# Altium footprint library Connector Power.PcbLib: 83 footprints (part 5 of 6)
Each footprint in its own frame and in the unit in brackets; x right, y up, seen from the top. Pads: shape width x height; smd on the part's side, far side on the other; paste and mask are expansions set on the pad; w line width, h text height; cw(c..) or ccw(c..) is an arc to the next point about the centre after c.
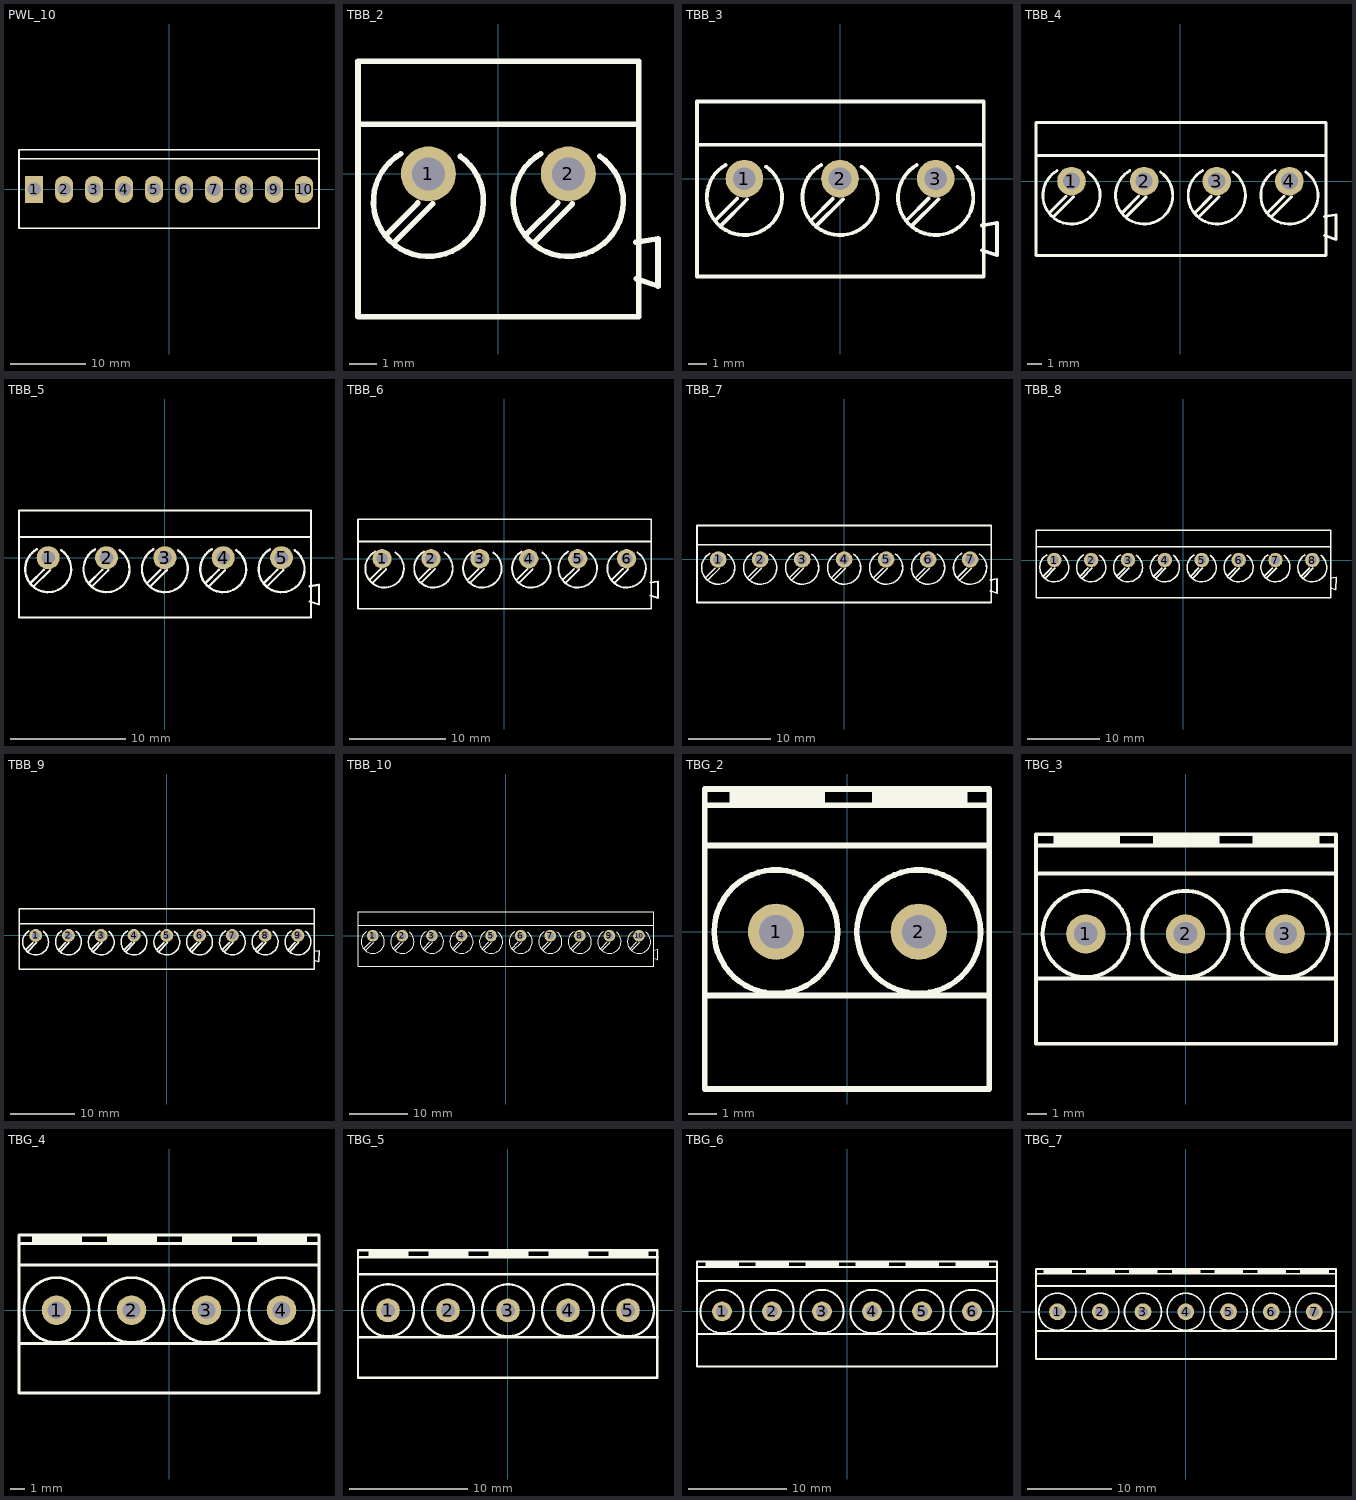
[diagram p4: the footprints below, top view; thin cyan lines are the x and y axes]

## PWL_10 [mm] "Connector; Header; 10 Position"
height 0.001
pads (10):
  rect 2.4x3.6 hole 1.8: 1(-17.82,0)
  oval 2.4x3.6 hole 1.8: 2(-13.86,0) 3(-9.9,0) 4(-5.94,0) 5(-1.98,0) 6(1.98,0) 7(5.94,0) 8(9.9,0) 9(13.86,0) 10(17.82,0)
Top Overlay:
  lines w0.2: -19.82,4.064 19.8,4.064 ; -19.82,-5.1 -19.82,5.207 19.8,5.207 19.8,-5.1 -19.82,-5.1
3D body "PWL-10.stp": height 13.5, standoff -4, extent -19.8,-5 19.8,5

## TBB_2 [mm] "Terminal Block Blue"
pads (2):
  round 2 / inner round 2 / far side rect 2.4x3 hole 1.2: 1(-2.54,0)
  round 2 / inner round 2 / far side oval 2.4x3 hole 1.2: 2(2.54,0)
Top Overlay:
  lines w0.2: -5.1,1.8 5.1,1.8 ; -4.071,-2.209 -2.921,-1.059 ; -3.789,-2.491 -2.389,-1.091 ; -3.54,0.732 ccw(c-2.54,-1) -1.393,0.638 ; 1.009,-2.209 2.159,-1.059 ; 1.291,-2.491 2.691,-1.091 ; 1.54,0.732 ccw(c2.54,-1) 3.687,0.638 ; 4.995,-2.484 5.8,-2.35 5.8,-4.075 5.004,-3.81 ; -5.1,-5.2 -5.1,4.1 5.1,4.1 5.1,-5.2 -5.1,-5.2
3D body "Socket Blue_2Pin.STEP": height 12.52, standoff -6.68, extent -4.965,-5.08 5.777,3.988

## TBB_3 [mm] "Terminal Block Blue"
pads (3):
  round 2 / inner round 2 / far side rect 2.4x3 hole 1.2: 1(-5.08,0)
  round 2 / inner round 2 / far side oval 2.4x3 hole 1.2: 2(0,0) 3(5.08,0)
Top Overlay:
  lines w0.2: -7.6,1.8 7.64,1.8 ; -6.611,-2.209 -5.461,-1.059 ; -6.329,-2.491 -4.929,-1.091 ; -6.08,0.732 ccw(c-5.08,-1) -3.933,0.638 ; -1.531,-2.209 -0.381,-1.059 ; -1.249,-2.491 0.151,-1.091 ; -1,0.732 ccw(c0,-1) 1.147,0.638 ; 3.549,-2.209 4.699,-1.059 ; 3.831,-2.491 5.231,-1.091 ; 4.08,0.732 ccw(c5.08,-1) 6.227,0.638 ; 7.535,-2.484 8.34,-2.35 8.34,-4.075 7.544,-3.81 ; -7.6,-5.2 7.64,-5.2 7.64,4.1 -7.6,4.1 -7.6,-5.2
3D body "Socket Blue_3Pin.STEP": height 12.78, standoff -6.43, extent -7.494,-5.069 8.328,3.999

## TBB_4 [mm] "Terminal Block Blue"
pads (4):
  round 2 / inner round 2 / far side rect 2.4x3 hole 1.2: 1(-7.62,0)
  round 2 / inner round 2 / far side oval 2.4x3 hole 1.2: 2(-2.54,0) 3(2.54,0) 4(7.62,0)
Top Overlay:
  lines w0.2: -10.1,1.8 10.18,1.8 ; -9.151,-2.209 -8.001,-1.059 ; -8.869,-2.491 -7.469,-1.091 ; -8.62,0.732 ccw(c-7.62,-1) -6.473,0.638 ; -4.071,-2.209 -2.921,-1.059 ; -3.789,-2.491 -2.389,-1.091 ; -3.54,0.732 ccw(c-2.54,-1) -1.393,0.638 ; 1.009,-2.209 2.159,-1.059 ; 1.291,-2.491 2.691,-1.091 ; 1.54,0.732 ccw(c2.54,-1) 3.687,0.638 ; 6.089,-2.209 7.239,-1.059 ; 6.371,-2.491 7.771,-1.091 ; 6.62,0.732 ccw(c7.62,-1) 8.767,0.638 ; 10.075,-2.484 10.88,-2.35 10.88,-4.075 10.084,-3.81 ; -10.1,-5.2 -10.1,4.1 10.18,4.1 10.18,-5.2 -10.1,-5.2
3D body "Socket Blue_4Pin.STEP": height 12.52, standoff -6.68, extent -10.031,-5.029 10.871,4.039

## TBB_5 [mm] "Terminal Block Blue"
pads (5):
  round 2 / inner round 2 / far side rect 2.4x3 hole 1.2: 1(-10.16,0)
  round 2 / inner round 2 / far side oval 2.4x3 hole 1.2: 2(-5.08,0) 3(0,0) 4(5.08,0) 5(10.16,0)
Top Overlay:
  lines w0.2: -12.7,1.8 12.72,1.8 ; -11.691,-2.209 -10.541,-1.059 ; -11.409,-2.491 -10.009,-1.091 ; -11.16,0.732 ccw(c-10.16,-1) -9.013,0.638 ; -6.611,-2.209 -5.461,-1.059 ; -6.329,-2.491 -4.929,-1.091 ; -6.08,0.732 ccw(c-5.08,-1) -3.933,0.638 ; -1.531,-2.209 -0.381,-1.059 ; -1.249,-2.491 0.151,-1.091 ; -1,0.732 ccw(c0,-1) 1.147,0.638 ; 3.549,-2.209 4.699,-1.059 ; 3.831,-2.491 5.231,-1.091 ; 4.08,0.732 ccw(c5.08,-1) 6.227,0.638 ; 8.629,-2.209 9.779,-1.059 ; 8.911,-2.491 10.311,-1.091 ; 9.16,0.732 ccw(c10.16,-1) 11.307,0.638 ; 12.615,-2.484 13.42,-2.35 13.42,-4.075 12.624,-3.81 ; -12.7,-5.2 -12.7,4.1 12.72,4.1 12.72,-5.2 -12.7,-5.2
3D body "Socket Blue_5Pin.STEP": height 12.52, standoff -6.68, extent -12.647,-5.042 13.335,4.026

## TBB_6 [mm] "Terminal Block Blue"
pads (6):
  round 2 / inner round 2 / far side rect 2.4x3 hole 1.2: 1(-12.7,0)
  round 2 / inner round 2 / far side oval 2.4x3 hole 1.2: 2(-7.62,0) 3(-2.54,0) 4(2.54,0) 5(7.62,0) 6(12.7,0)
Top Overlay:
  lines w0.2: -15.2,1.8 15.26,1.8 ; -13.971,-2.209 -12.821,-1.059 ; -13.689,-2.491 -12.289,-1.091 ; -13.44,0.732 ccw(c-12.44,-1) -11.293,0.638 ; -8.891,-2.209 -7.741,-1.059 ; -8.609,-2.491 -7.209,-1.091 ; -8.36,0.732 ccw(c-7.36,-1) -6.213,0.638 ; -3.811,-2.209 -2.661,-1.059 ; -3.529,-2.491 -2.129,-1.091 ; -3.28,0.732 ccw(c-2.28,-1) -1.133,0.638 ; 1.269,-2.209 2.419,-1.059 ; 1.551,-2.491 2.951,-1.091 ; 1.8,0.732 ccw(c2.8,-1) 3.947,0.638 ; 6.089,-2.209 7.239,-1.059 ; 6.371,-2.491 7.771,-1.091 ; 6.62,0.732 ccw(c7.62,-1) 8.767,0.638 ; 11.169,-2.209 12.319,-1.059 ; 11.451,-2.491 12.851,-1.091 ; 11.7,0.732 ccw(c12.7,-1) 13.847,0.638 ; 15.155,-2.484 15.96,-2.35 15.96,-4.075 15.164,-3.81 ; -15.2,-5.2 15.26,-5.2 15.26,4.1 -15.2,4.1 -15.2,-5.2
3D body "Socket Blue_6Pin.STEP": height 12.52, standoff -6.68, extent -15.138,-5.029 15.924,4.039

## TBB_7 [mm] "Terminal Block Blue"
pads (7):
  round 2 / inner round 2 / far side rect 2.4x3 hole 1.2: 1(-15.24,0)
  round 2 / inner round 2 / far side oval 2.4x3 hole 1.2: 2(-10.16,0) 3(-5.08,0) 4(0,0) 5(5.08,0) 6(10.16,0) 7(15.24,0)
Top Overlay:
  lines w0.2: -17.8,1.8 17.8,1.8 ; -16.771,-2.209 -15.621,-1.059 ; -16.489,-2.491 -15.089,-1.091 ; -16.24,0.732 ccw(c-15.24,-1) -14.093,0.638 ; -11.691,-2.209 -10.541,-1.059 ; -11.409,-2.491 -10.009,-1.091 ; -11.16,0.732 ccw(c-10.16,-1) -9.013,0.638 ; -6.611,-2.209 -5.461,-1.059 ; -6.329,-2.491 -4.929,-1.091 ; -6.08,0.732 ccw(c-5.08,-1) -3.933,0.638 ; -1.531,-2.209 -0.381,-1.059 ; -1.249,-2.491 0.151,-1.091 ; -1,0.732 ccw(c0,-1) 1.147,0.638 ; 3.549,-2.209 4.699,-1.059 ; 3.831,-2.491 5.231,-1.091 ; 4.08,0.732 ccw(c5.08,-1) 6.227,0.638 ; 8.629,-2.209 9.779,-1.059 ; 8.911,-2.491 10.311,-1.091 ; 9.16,0.732 ccw(c10.16,-1) 11.307,0.638 ; 13.709,-2.209 14.859,-1.059 ; 13.991,-2.491 15.391,-1.091 ; 14.24,0.732 ccw(c15.24,-1) 16.387,0.638 ; 17.695,-2.484 18.5,-2.35 18.5,-4.075 17.704,-3.81 ; -17.8,-5.2 17.8,-5.2 17.8,4.1 -17.8,4.1 -17.8,-5.2
3D body "Socket Blue_7Pin.STEP": height 12.52, standoff -6.68, extent -17.685,-5.025 18.457,4.042

## TBB_8 [mm] "Terminal Block Blue"
pads (8):
  round 2 / inner round 2 / far side rect 2.4x3 hole 1.2: 1(-17.78,0)
  round 2 / inner round 2 / far side oval 2.4x3 hole 1.2: 2(-12.7,0) 3(-7.62,0) 4(-2.54,0) 5(2.54,0) 6(7.62,0) 7(12.7,0) 8(17.78,0)
Top Overlay:
  lines w0.2: -20.3,1.8 20.34,1.8 ; -19.311,-2.209 -18.161,-1.059 ; -19.029,-2.491 -17.629,-1.091 ; -18.78,0.732 ccw(c-17.78,-1) -16.633,0.638 ; -14.231,-2.209 -13.081,-1.059 ; -13.949,-2.491 -12.549,-1.091 ; -13.7,0.732 ccw(c-12.7,-1) -11.553,0.638 ; -9.151,-2.209 -8.001,-1.059 ; -8.869,-2.491 -7.469,-1.091 ; -8.62,0.732 ccw(c-7.62,-1) -6.473,0.638 ; -4.071,-2.209 -2.921,-1.059 ; -3.789,-2.491 -2.389,-1.091 ; -3.54,0.732 ccw(c-2.54,-1) -1.393,0.638 ; 1.009,-2.209 2.159,-1.059 ; 1.291,-2.491 2.691,-1.091 ; 1.54,0.732 ccw(c2.54,-1) 3.687,0.638 ; 6.089,-2.209 7.239,-1.059 ; 6.371,-2.491 7.771,-1.091 ; 6.62,0.732 ccw(c7.62,-1) 8.767,0.638 ; 11.169,-2.209 12.319,-1.059 ; 11.451,-2.491 12.851,-1.091 ; 11.7,0.732 ccw(c12.7,-1) 13.847,0.638 ; 16.249,-2.209 17.399,-1.059 ; 16.531,-2.491 17.931,-1.091 ; 16.78,0.732 ccw(c17.78,-1) 18.927,0.638 ; 20.235,-2.484 21.04,-2.35 21.04,-4.075 20.244,-3.81 ; -20.3,-5.2 20.34,-5.2 20.34,4.1 -20.3,4.1 -20.3,-5.2
3D body "Socket Blue_8Pin.STEP": height 12.52, standoff -6.68, extent -20.216,-5.017 21.006,4.051

## TBB_9 [mm] "Terminal Block Blue"
pads (9):
  round 2 / inner round 2 / far side rect 2.4x3 hole 1.2: 1(-20.32,0)
  round 2 / inner round 2 / far side oval 2.4x3 hole 1.2: 2(-15.24,0) 3(-10.16,0) 4(-5.08,0) 5(0,0) 6(5.08,0) 7(10.16,0) 8(15.24,0) 9(20.32,0)
Top Overlay:
  lines w0.2: -22.9,1.8 22.88,1.8 ; -21.851,-2.209 -20.701,-1.059 ; -21.569,-2.491 -20.169,-1.091 ; -21.32,0.732 ccw(c-20.32,-1) -19.173,0.638 ; -16.771,-2.209 -15.621,-1.059 ; -16.489,-2.491 -15.089,-1.091 ; -16.24,0.732 ccw(c-15.24,-1) -14.093,0.638 ; -11.691,-2.209 -10.541,-1.059 ; -11.409,-2.491 -10.009,-1.091 ; -11.16,0.732 ccw(c-10.16,-1) -9.013,0.638 ; -6.611,-2.209 -5.461,-1.059 ; -6.329,-2.491 -4.929,-1.091 ; -6.08,0.732 ccw(c-5.08,-1) -3.933,0.638 ; -1.531,-2.209 -0.381,-1.059 ; -1.249,-2.491 0.151,-1.091 ; -1,0.732 ccw(c0,-1) 1.147,0.638 ; 3.549,-2.209 4.699,-1.059 ; 3.831,-2.491 5.231,-1.091 ; 4.08,0.732 ccw(c5.08,-1) 6.227,0.638 ; 8.629,-2.209 9.779,-1.059 ; 8.911,-2.491 10.311,-1.091 ; 9.16,0.732 ccw(c10.16,-1) 11.307,0.638 ; 13.709,-2.209 14.859,-1.059 ; 13.991,-2.491 15.391,-1.091 ; 14.24,0.732 ccw(c15.24,-1) 16.387,0.638 ; 18.789,-2.209 19.939,-1.059 ; 19.071,-2.491 20.471,-1.091 ; 19.32,0.732 ccw(c20.32,-1) 21.467,0.638 ; 22.775,-2.484 23.58,-2.35 23.58,-4.075 22.784,-3.81 ; -22.9,-5.2 22.88,-5.2 22.88,4.1 -22.9,4.1 -22.9,-5.2
3D body "Socket Blue_9Pin.STEP": height 12.52, standoff -6.68, extent -22.758,-5.055 23.544,4.013

## TBB_10 [mm] "Terminal Block Blue"
pads (10):
  round 2 / inner round 2 / far side rect 2.4x3 hole 1.2: 1(-22.86,0)
  round 2 / inner round 2 / far side oval 2.4x3 hole 1.2: 2(-17.78,0) 3(-12.7,0) 4(-7.62,0) 5(-2.54,0) 6(2.54,0) 7(7.62,0) 8(12.7,0) 9(17.78,0) 10(22.86,0)
Top Overlay:
  lines w0.2: -25.4,1.8 25.42,1.8 ; -24.391,-2.209 -23.241,-1.059 ; -24.109,-2.491 -22.709,-1.091 ; -23.86,0.732 ccw(c-22.86,-1) -21.713,0.638 ; -19.311,-2.209 -18.161,-1.059 ; -19.029,-2.491 -17.629,-1.091 ; -18.78,0.732 ccw(c-17.78,-1) -16.633,0.638 ; -14.231,-2.209 -13.081,-1.059 ; -13.949,-2.491 -12.549,-1.091 ; -13.7,0.732 ccw(c-12.7,-1) -11.553,0.638 ; -9.151,-2.209 -8.001,-1.059 ; -8.869,-2.491 -7.469,-1.091 ; -8.62,0.732 ccw(c-7.62,-1) -6.473,0.638 ; -4.071,-2.209 -2.921,-1.059 ; -3.789,-2.491 -2.389,-1.091 ; -3.54,0.732 ccw(c-2.54,-1) -1.393,0.638 ; 1.009,-2.209 2.159,-1.059 ; 1.291,-2.491 2.691,-1.091 ; 1.54,0.732 ccw(c2.54,-1) 3.687,0.638 ; 6.089,-2.209 7.239,-1.059 ; 6.371,-2.491 7.771,-1.091 ; 6.62,0.732 ccw(c7.62,-1) 8.767,0.638 ; 11.169,-2.209 12.319,-1.059 ; 11.451,-2.491 12.851,-1.091 ; 11.7,0.732 ccw(c12.7,-1) 13.847,0.638 ; 16.249,-2.209 17.399,-1.059 ; 16.531,-2.491 17.931,-1.091 ; 16.78,0.732 ccw(c17.78,-1) 18.927,0.638 ; 21.329,-2.209 22.479,-1.059 ; 21.611,-2.491 23.011,-1.091 ; 21.86,0.732 ccw(c22.86,-1) 24.007,0.638 ; 25.315,-2.484 26.12,-2.35 26.12,-4.075 25.324,-3.81 ; -25.4,-5.2 -25.4,4.1 25.42,4.1 25.42,-5.2 -25.4,-5.2
3D body "Socket Blue_10Pin.STEP": height 12.52, standoff -6.68, extent -25.298,-4.991 26.086,4.077

## TBG_2 [mm] "Terminal Block Green"
pads (2):
  round 2 / inner round 2 / far side oval 2.4x3 hole 1.2: 1(-2.54,0) 2(2.54,0)
Top Overlay:
  circle w0.2: c2.54,0 r2.2
  circle w0.2: c-2.54,0 r2.2
  rectangle: 0.88,4.5 4.28,5.08
  rectangle: -4.2,4.5 -0.8,5.08
  lines w0.2: -5.08,-2.27 5.055,-2.27 ; -5.08,3.07 5.055,3.07 ; -5.08,4.5 5.055,4.5 ; -5.08,-5.6 -5.08,5.08 5.055,5.08 5.055,-5.6 -5.08,-5.6
3D body "User Library-klema-5mm-2pin.step": height 14, standoff -4, extent -5,-5.5 5,5

## TBG_3 [mm] "Terminal Block Green"
pads (3):
  round 2 / inner round 2 / far side oval 2.4x3 hole 1.2: 1(-5.08,0) 2(0,0) 3(5.08,0)
Top Overlay:
  circle w0.2: c5.08,0 r2.2
  circle w0.2: c0,0 r2.2
  circle w0.2: c-5.08,0 r2.2
  rectangle: -6.74,4.5 -3.34,5.08
  rectangle: -1.66,4.5 1.74,5.08
  rectangle: 3.42,4.5 6.82,5.08
  lines w0.2: -7.62,-2.27 7.6,-2.27 ; -7.62,3.07 7.6,3.07 ; -7.62,4.5 7.6,4.5 ; -7.62,-5.6 7.671,-5.6 7.671,5.08 -7.62,5.08 -7.62,-5.6
3D body "User Library-klema-5mm-3pin.step": height 14.1, standoff -3.9, extent -7.5,-5.5 7.5,5

## TBG_4 [mm] "Terminal Block Green"
pads (4):
  round 2 / inner round 2 / far side oval 2.4x3 hole 1.2: 1(-7.62,0) 2(-2.54,0) 3(2.54,0) 4(7.62,0)
Top Overlay:
  circle w0.2: c7.62,0 r2.2
  circle w0.2: c2.54,0 r2.2
  circle w0.2: c-2.54,0 r2.2
  circle w0.2: c-7.62,0 r2.2
  rectangle: 5.96,4.5 9.36,5.08
  rectangle: 0.88,4.5 4.28,5.08
  rectangle: -4.2,4.5 -0.8,5.08
  rectangle: -9.28,4.5 -5.88,5.08
  lines w0.2: -10.16,-2.27 10.16,-2.27 ; -10.16,3.07 10.16,3.07 ; -10.16,4.5 10.16,4.5 ; -10.16,-5.6 10.16,-5.6 10.16,5.08 -10.16,5.08 -10.16,-5.6
3D body "User Library-klema-5mm-2pin.step": height 14, standoff -4, extent 0.08,-5.5 10.08,5
3D body "User Library-klema-5mm-2pin.step": height 14, standoff -4, extent -10.08,-5.5 -0.08,5

## TBG_5 [mm] "Terminal Block Green"
pads (5):
  round 2 / inner round 2 / far side oval 2.4x3 hole 1.2: 1(-10.16,0) 2(-5.08,0) 3(0,0) 4(5.08,0) 5(10.16,0)
Top Overlay:
  circle w0.2: c-10.16,0 r2.2
  circle w0.2: c-5.08,0 r2.2
  circle w0.2: c0,0 r2.2
  circle w0.2: c5.08,0 r2.2
  circle w0.2: c10.16,0 r2.2
  rectangle: -11.82,4.5 -8.42,5.08
  rectangle: -6.74,4.5 -3.34,5.08
  rectangle: -1.66,4.5 1.74,5.08
  rectangle: 3.42,4.5 6.82,5.08
  rectangle: 8.5,4.5 11.9,5.08
  lines w0.2: -12.7,-2.27 12.7,-2.27 ; -12.7,3.07 12.7,3.07 ; -12.7,4.5 12.7,4.5 ; -12.7,-5.7 -12.7,5.08 12.649,5.08 12.649,-5.7 -12.7,-5.7
3D body "User Library-klema-5mm-3pin.step": height 14.1, standoff -3.9, extent -12.58,-5.5 2.42,5
3D body "User Library-klema-5mm-2pin.step": height 14, standoff -4, extent 2.62,-5.5 12.62,5

## TBG_6 [mm] "Terminal Block Green"
pads (6):
  round 2 / inner round 2 / far side oval 2.4x3 hole 1.2: 1(-12.7,0) 2(-7.62,0) 3(-2.54,0) 4(2.54,0) 5(7.62,0) 6(12.7,0)
Top Overlay:
  circle w0.2: c-12.7,0 r2.2
  circle w0.2: c-7.62,0 r2.2
  circle w0.2: c-2.54,0 r2.2
  circle w0.2: c2.54,0 r2.2
  circle w0.2: c7.62,0 r2.2
  circle w0.2: c12.7,0 r2.2
  rectangle: -14.36,4.5 -10.96,5.08
  rectangle: -9.28,4.5 -5.88,5.08
  rectangle: -4.2,4.5 -0.8,5.08
  rectangle: 0.88,4.5 4.28,5.08
  rectangle: 5.96,4.5 9.36,5.08
  rectangle: 11.04,4.5 14.44,5.08
  lines w0.2: -15.24,-2.27 15.2,-2.27 ; -15.24,3.07 15.2,3.07 ; -15.24,4.5 15.2,4.5 ; -15.24,-5.6 15.24,-5.6 15.24,5.08 -15.24,5.08 -15.24,-5.6
3D body "User Library-klema-5mm-3pin.step": height 14.1, standoff -3.9, extent 0.12,-5.5 15.12,5
3D body "User Library-klema-5mm-3pin.step": height 14.1, standoff -3.9, extent -15.12,-5.5 -0.12,5

## TBG_7 [mm] "Terminal Block Green"
pads (7):
  round 2 / inner round 2 / far side oval 2.4x3 hole 1.2: 1(-15.24,0) 2(-10.16,0) 3(-5.08,0) 4(0,0) 5(5.08,0) 6(10.16,0) 7(15.24,0)
Top Overlay:
  circle w0.2: c15.24,0 r2.2
  circle w0.2: c10.16,0 r2.2
  circle w0.2: c5.08,0 r2.2
  circle w0.2: c0,0 r2.2
  circle w0.2: c-5.08,0 r2.2
  circle w0.2: c-10.16,0 r2.2
  circle w0.2: c-15.24,0 r2.2
  rectangle: 13.58,4.5 16.98,5.08
  rectangle: 8.5,4.5 11.9,5.08
  rectangle: 3.42,4.5 6.82,5.08
  rectangle: -1.66,4.5 1.74,5.08
  rectangle: -6.74,4.5 -3.34,5.08
  rectangle: -11.82,4.5 -8.42,5.08
  rectangle: -16.9,4.5 -13.5,5.08
  lines w0.2: -17.78,-2.27 17.8,-2.27 ; -17.78,3.07 17.8,3.07 ; -17.78,4.5 17.8,4.5 ; -17.78,-5.6 17.831,-5.6 17.831,5.08 -17.78,5.08 -17.78,-5.6
3D body "User Library-klema-5mm-3pin.step": height 14.1, standoff -3.9, extent 2.66,-5.5 17.66,5
3D body "User Library-klema-5mm-2pin.step": height 14, standoff -4, extent -17.7,-5.5 -7.7,5
3D body "User Library-klema-5mm-2pin.step": height 14, standoff -4, extent -7.54,-5.5 2.46,5